# Altium footprint library PcbLib1.PcbLib: 38 footprints (part 2 of 3)
Each footprint in its own frame and in the unit in brackets; x right, y up, seen from the top. Pads: shape width x height; smd on the part's side, far side on the other; paste and mask are expansions set on the pad; w line width, h text height; cw(c..) or ccw(c..) is an arc to the next point about the centre after c.
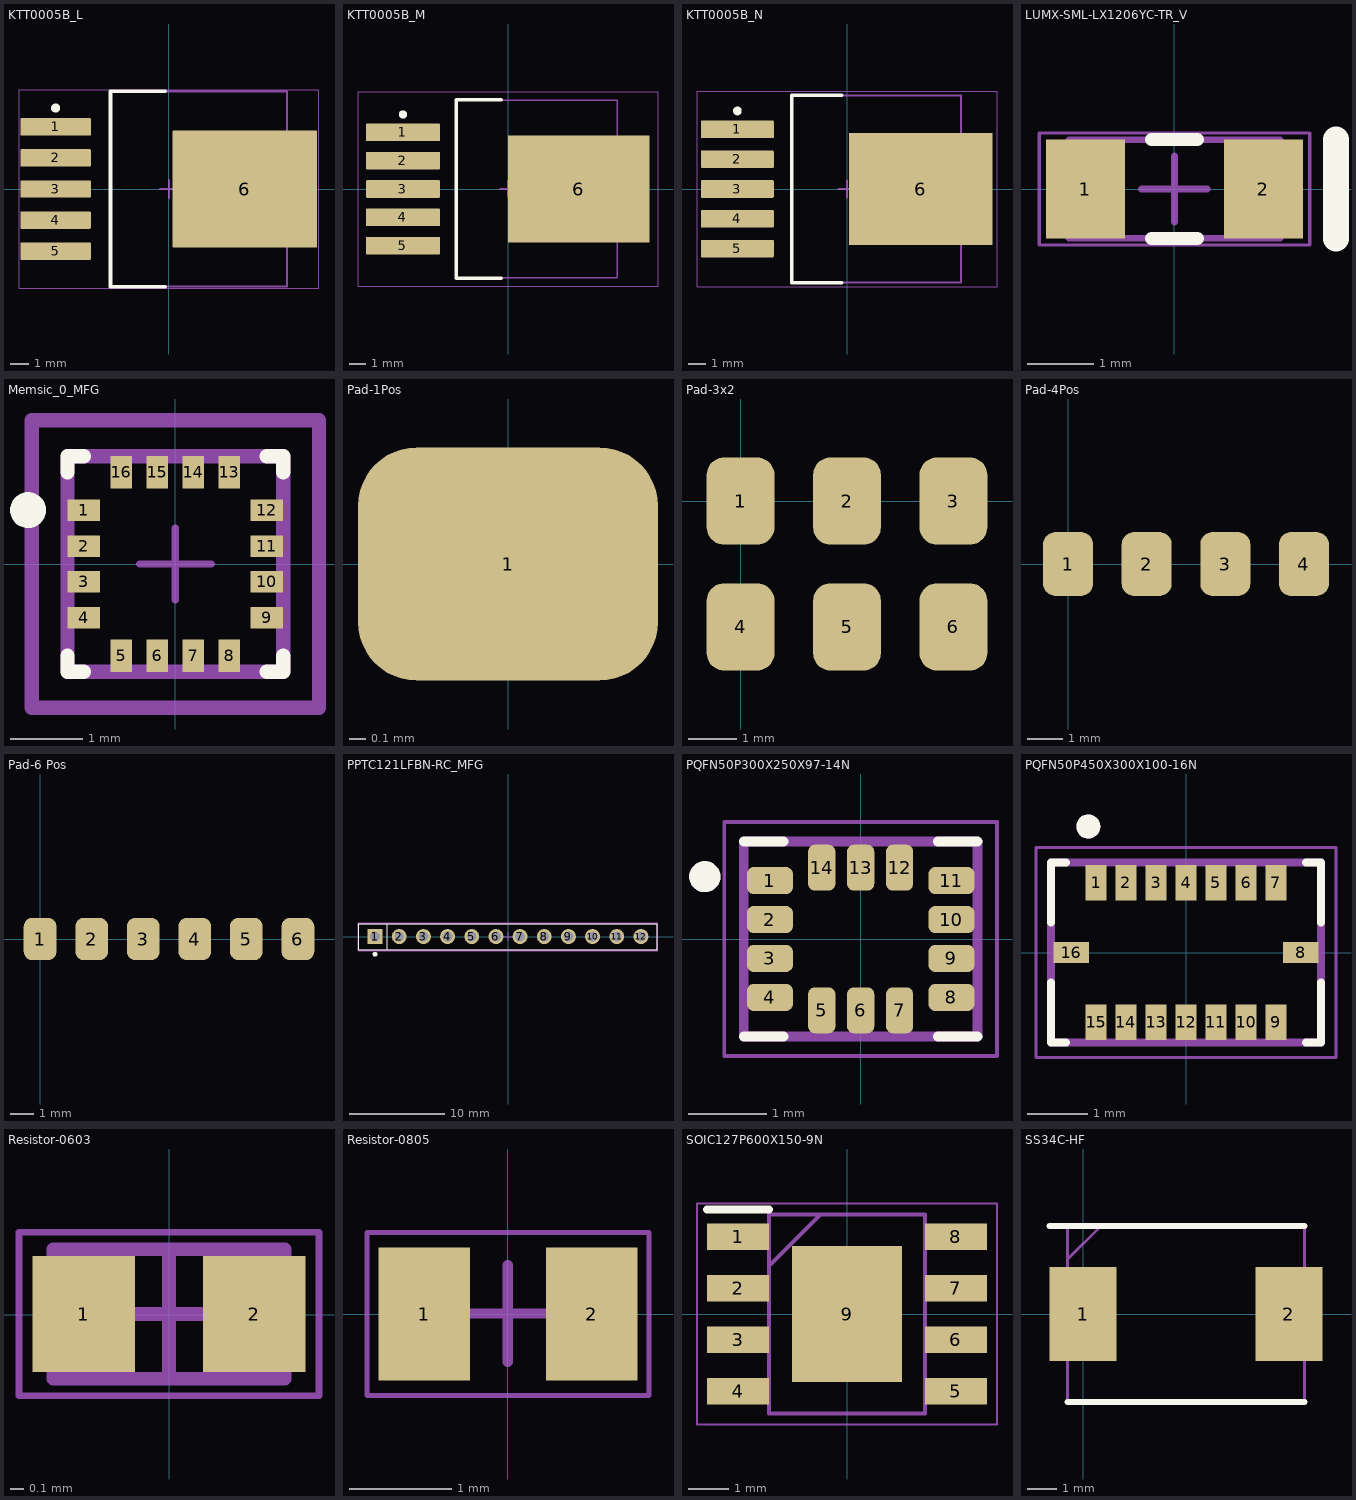
[diagram p1: the footprints below, top view; thin cyan lines are the x and y axes]

## KTT0005B_L [mm] "DPAK, 5-Leads, Body 10.65x9.65mm, Pitch 1.7mm, IPC High Density"
height 4.83
pads (6):
  rrect11% 3.85x0.95 smd: 1(-6.2,3.4) 2(-6.2,1.7) 3(-6.2,0) 4(-6.2,-1.7) 5(-6.2,-3.4)
  rrect2% 7.9x6.4 smd: 6(4.15,0)
Top Overlay:
  circle w0.25: c-6.2,4.425 r0.125
  lines w0.2: -0.2,-5.35 -3.2,-5.35 -3.2,5.35 -0.2,5.35
Mechanical 1:
  text ".Designator" at -1.905,-0.508 h1.3
Mechanical 13:
  lines w0.1: -3.2,-5.325 -3.2,5.325 6.45,5.325 6.45,-5.325 -3.2,-5.325
Mechanical 15:
  lines w0.05: -8.2,-5.425 -8.2,5.425 8.2,5.425 8.2,-5.425 -8.2,-5.425
  lines w0.1: -0.5,0 0.5,0 ; 0,-0.5 0,0.5
3D body "LM2596S-5.0_NOPB.stp": height 4.57, standoff -0.15, extent -7.302,-5.08 7.048,5.08

## KTT0005B_M [mm] "DPAK, 5-Leads, Body 10.65x9.65mm, Pitch 1.7mm, IPC Low Density"
height 4.83
pads (6):
  rrect10% 4.45x1.05 smd: 1(-6.3,3.4) 2(-6.3,1.7) 3(-6.3,0) 4(-6.3,-1.7) 5(-6.3,-3.4)
  rrect2% 8.5x6.45 smd: 6(4.25,0)
Top Overlay:
  circle w0.25: c-6.3,4.475 r0.125
  lines w0.2: -0.4,-5.35 -3.1,-5.35 -3.1,5.35 -0.4,5.35
Mechanical 1:
  text ".Designator" at -1.905,-0.635 h1.3
Mechanical 13:
  lines w0.1: -3.1,-5.325 6.55,-5.325 6.55,5.325 -3.1,5.325 -3.1,-5.325
Mechanical 15:
  lines w0.05: -9,-5.825 9,-5.825 9,5.825 -9,5.825 -9,-5.825
  lines w0.1: -0.5,0 0.5,0 ; 0,-0.5 0,0.5
3D body "LM2596S-5.0_NOPB.stp": height 4.57, standoff -0.15, extent -7.302,-5.08 7.048,5.08

## KTT0005B_N [mm] "DPAK, 5-Leads, Body 10.65x9.65mm, Pitch 1.7mm, IPC Medium Density"
height 4.83
pads (6):
  rrect10% 4.15x1 smd: 1(-6.25,3.4) 2(-6.25,1.7) 3(-6.25,0) 4(-6.25,-1.7) 5(-6.25,-3.4)
  rrect2% 8.2x6.4 smd: 6(4.2,0)
Top Overlay:
  circle w0.25: c-6.25,4.45 r0.125
  lines w0.2: -0.3,-5.35 -3.15,-5.35 -3.15,5.35 -0.3,5.35
Mechanical 1:
  text ".Designator" at -1.905,-0.508 h1.3
Mechanical 13:
  lines w0.1: -3.15,-5.325 6.5,-5.325 6.5,5.325 -3.15,5.325 -3.15,-5.325
Mechanical 15:
  lines w0.05: -8.55,-5.575 8.55,-5.575 8.55,5.575 -8.55,5.575 -8.55,-5.575
  lines w0.1: -0.5,0 0.5,0 ; 0,-0.5 0,0.5
3D body "LM2596S-5.0_NOPB.stp": height 4.57, standoff -0.15, extent -7.175,-5.08 7.175,5.08

## LUMX-SML-LX1206YC-TR_V [mm] "SMD, 2-Leads, Body 3.2x1.5mm"
height 1.25
pads (2):
  rect 1.2x1.5 smd: 1(-1.35,0) 2(1.35,0)
Top Overlay:
  lines w0.2: -0.35,-0.75 0.35,-0.75 ; -0.35,0.75 0.35,0.75
  lines w0.4: 2.45,-0.75 2.45,0.75
Mechanical 13:
  lines w0.1: -1.6,-0.75 1.6,-0.75 1.6,0.75 -1.6,0.75 -1.6,-0.75
Mechanical 15:
  lines w0.05: -2.05,-0.85 -2.05,0.85 2.05,0.85 2.05,-0.85 -2.05,-0.85
  lines w0.1: -0.5,0 0.5,0 ; 0,-0.5 0,0.5
3D body "SML-LX1206YC-TR--3DModel-STEP-269445.STEP": height 1.1, standoff 0, extent -1.6,-0.75 1.6,0.75

## Memsic_0_MFG [mm]
pads (16):
  rect 0.45x0.3 smd paste+0 mask+0: 1(-1.275,0.75) 2(-1.275,0.25) 3(-1.275,-0.25) 4(-1.275,-0.75) 9(1.275,-0.75) 10(1.275,-0.25) 11(1.275,0.25) 12(1.275,0.75)
  rect 0.3x0.45 smd paste+0 mask+0: 5(-0.75,-1.275) 6(-0.25,-1.275) 7(0.25,-1.275) 8(0.75,-1.275) 13(0.75,1.275) 14(0.25,1.275) 15(-0.25,1.275) 16(-0.75,1.275)
Top Overlay:
  circle w0.25: c-2.05,0.75 r0.125
  lines w0.2: -1.5,-1.275 -1.5,-1.5 -1.275,-1.5 ; -1.5,1.275 -1.5,1.5 -1.275,1.5 ; 1.275,-1.5 1.5,-1.5 1.5,-1.275 ; 1.275,1.5 1.5,1.5 1.5,1.275
Mechanical 10:
  lines w0.2: -2,-2 2,-2 2,2 -2,2 -2,-2
  text ".Designator" at 0,0.188 h1
Bottom Designator:
  lines w0.2: -1.5,-1.5 1.5,-1.5 1.5,1.5 -1.5,1.5 -1.5,-1.5
Mechanical 15:
  lines w0.1: -0.5,0 0.5,0 ; 0,-0.5 0,0.5
  lines w0.2: -2,-2 2,-2 2,2 -2,2 -2,-2
3D body "IC_Memsic_MMC5983MA_eec.STEP": height 0.25, standoff 0, extent -2,-2 2,2

## Pad-1Pos [mm]
pads (1):
  rrect50% 1.8x1.4 smd: 1(0,0)

## Pad-3x2 [mm]
pads (6):
  rrect50% 1.4x1.8 smd: 1(0,0) 2(2.2,0) 3(4.4,0) 4(0,-2.6) 5(2.2,-2.6) 6(4.4,-2.6)

## Pad-4Pos [mm]
pads (4):
  rrect50% 1.4x1.8 smd: 1(0,0) 2(2.2,0) 3(4.4,0) 4(6.6,0)

## Pad-6 Pos [mm]
pads (6):
  rrect50% 1.4x1.8 smd: 1(0,0) 2(2.2,0) 3(4.4,0) 4(6.6,0) 5(8.8,0) 6(11,0)

## PPTC121LFBN-RC_MFG [mm] "Recommended Land Pattern"
height 8.7
pads (12):
  rect 1.57x1.57 hole 1.02: 1(-13.97,0)
  round 1.57 hole 1.02: 2(-11.43,0) 3(-8.89,0) 4(-6.35,0) 5(-3.81,0) 6(-1.27,0) 7(1.27,0) 8(3.81,0) 9(6.35,0) 10(8.89,0) 11(11.43,0) 12(13.97,0)
Top Overlay:
  circle w0.25: c-13.97,-1.85 r0.125
  lines w0.127: -12.7,-1.37 -12.7,1.37 ; -15.665,-1.37 -15.665,1.37 15.665,1.37 15.665,-1.37 -15.665,-1.37
Top Courtyard:
  lines w0.05: -15.765,-1.47 -15.765,1.47 15.765,1.47 15.765,-1.47 -15.765,-1.47
Top Assembly:
  lines w0.1: -15.665,-1.37 -15.665,1.37 15.665,1.37 15.665,-1.37 -15.665,-1.37
Top Designator:
  text ".Designator" at 0,0.188 h1
Top Component Center:
  lines w0.1: -0.441,0 0.441,0 ; 0,-0.441 0,0.441
3D body "PPTC121LFBN-RC.STEP": height 0.25, standoff 0, extent -15.765,-1.47 15.765,1.47

## PQFN50P300X250X97-14N [mm]
pads (14):
  rrect50% 0.59x0.35 smd mask+0: 1(-1.165,0.75) 2(-1.165,0.25) 3(-1.165,-0.25) 4(-1.165,-0.75) 8(1.165,-0.75) 9(1.165,-0.25) 10(1.165,0.25) 11(1.165,0.75)
  rrect50% 0.35x0.59 smd mask+0: 5(-0.5,-0.915) 6(0,-0.915) 7(0.5,-0.915) 12(0.5,0.915) 13(0,0.915) 14(-0.5,0.915)
Top Overlay:
  circle w0.2: c-2,0.8 r0.1
  lines w0.127: -1.5,-1.25 -0.99,-1.25 ; -1.5,1.25 -0.99,1.25 ; 0.99,-1.25 1.5,-1.25 ; 0.99,1.25 1.5,1.25
Top Solder:
  drawing of 14 lines, arcs and shapes, not listed
Mechanical 13:
  circle w0.2: c-2,0.8 r0.1
  lines w0.127: -1.5,-1.25 -1.5,1.25 1.5,1.25 1.5,-1.25 -1.5,-1.25
Mechanical 15:
  lines w0.05: -1.75,-1.5 -1.75,1.5 1.75,1.5 1.75,-1.5 -1.75,-1.5
3D body "ICM-42688-P--3DModel-STEP-1.STEP": height 0.97, standoff 0, extent -1.5,-1.25 1.5,1.25

## PQFN50P450X300X100-16N [mm]
pads (16):
  rect 0.35x0.59 smd: 1(-1.5,1.165) 2(-1,1.165) 3(-0.5,1.165) 4(0,1.165) 5(0.5,1.165) 6(1,1.165) 7(1.5,1.165) 9(1.5,-1.165) 10(1,-1.165) 11(0.5,-1.165) 12(0,-1.165) 13(-0.5,-1.165) 14(-1,-1.165) 15(-1.5,-1.165)
  rect 0.59x0.35 smd: 8(1.915,0) 16(-1.915,0)
Top Overlay:
  circle w0.2: c-1.629,2.1 r0.1
  lines w0.127: -2.25,-0.5 -2.25,-1.5 -2,-1.5 ; -2.25,0.5 -2.25,1.5 -2,1.5 ; 2,-1.5 2.25,-1.5 2.25,-0.5 ; 2,1.5 2.25,1.5 2.25,0.5
Mechanical 13:
  circle w0.2: c-1.629,2.1 r0.1
  lines w0.127: -2.25,-1.5 -2.25,1.5 2.25,1.5 2.25,-1.5 -2.25,-1.5
Mechanical 15:
  lines w0.05: -2.5,-1.75 -2.5,1.75 2.5,1.75 2.5,-1.75 -2.5,-1.75
3D body "BMI088--3DModel-STEP-56544.STEP": height 1, standoff 0, extent -2.25,-1.5 2.25,1.5

## Resistor-0603 [mm]
pads (2):
  rect 0.75x0.85 smd: 1(-0.627,0.005) 2(0.623,0.005)
Mechanical 13:
  lines w0.1: -0.852,-0.47 0.848,-0.47 0.848,0.48 -0.852,0.48 -0.852,-0.47
Mechanical 15:
  lines w0.05: -1.102,-0.595 1.098,-0.595 1.098,0.605 -1.102,0.605 -1.102,-0.595
  lines w0.1: -0.477,0.005 0.473,0.005 ; -0.002,-0.47 -0.002,0.48
3D body "RQ73C1J44R2BTD.STEP": height 0.6, standoff 0, extent -0.785,-0.39 0.765,0.41

## Resistor-0805 [mm]
pads (2):
  rect 0.9x1.3 smd: 1(-0.82,0) 2(0.82,0)
Mechanical 15:
  lines w0.05: -1.38,-0.8 1.38,-0.8 1.38,0.8 -1.38,0.8 -1.38,-0.8
  lines w0.1: -0.477,0.005 0.473,0.005 ; -0.002,-0.47 -0.002,0.48
3D body "CPF0805B22R1E1.STEP": height 0.65, standoff 0, extent -1,-0.625 1,0.625

## SOIC127P600X150-9N [mm]
pads (9):
  rect 1.525x0.65 smd: 1(-2.688,1.905) 2(-2.688,0.635) 3(-2.688,-0.635) 4(-2.688,-1.905) 5(2.688,-1.905) 6(2.688,-0.635) 7(2.688,0.635) 8(2.688,1.905)
  rect 2.71x3.35 smd: 9(0,0)
Top Overlay:
  lines w0.2: -3.45,2.58 -1.925,2.58
Mechanical 15:
  lines w0.1: -1.925,1.18 -0.655,2.45 ; -1.925,-2.45 -1.925,2.45 1.925,2.45 1.925,-2.45 -1.925,-2.45
Bottom Assembly:
  lines w0.05: -3.7,-2.725 -3.7,2.725 3.7,2.725 3.7,-2.725 -3.7,-2.725
3D body "AP7362A-33SP-13.stp": height 1.5, standoff 0, extent -3,-2.4 3,2.5

## SS34C-HF [mm]
pads (2):
  rect 2.25x3.15 smd: 1(0,0) 2(6.9,0)
Top Overlay:
  lines w0.2: -1.125,2.95 7.425,2.95 ; -0.525,-2.95 7.425,-2.95
Mechanical 15:
  lines w0.1: -0.525,1.825 0.6,2.95 ; -0.525,-2.95 -0.525,2.95 7.425,2.95 7.425,-2.95 -0.525,-2.95
3D body "MBRS340T3G.stp": height 2.61, standoff 0, extent -0.525,-2.95 7.425,2.95